# Altium footprint library LimeMicroAltiumLib.PcbLib: 876 footprints (part 53 of 57)
Each footprint in its own frame and in the unit in brackets; x right, y up, seen from the top. Pads: shape width x height; smd on the part's side, far side on the other; paste and mask are expansions set on the pad; w line width, h text height; cw(c..) or ccw(c..) is an arc to the next point about the centre after c.
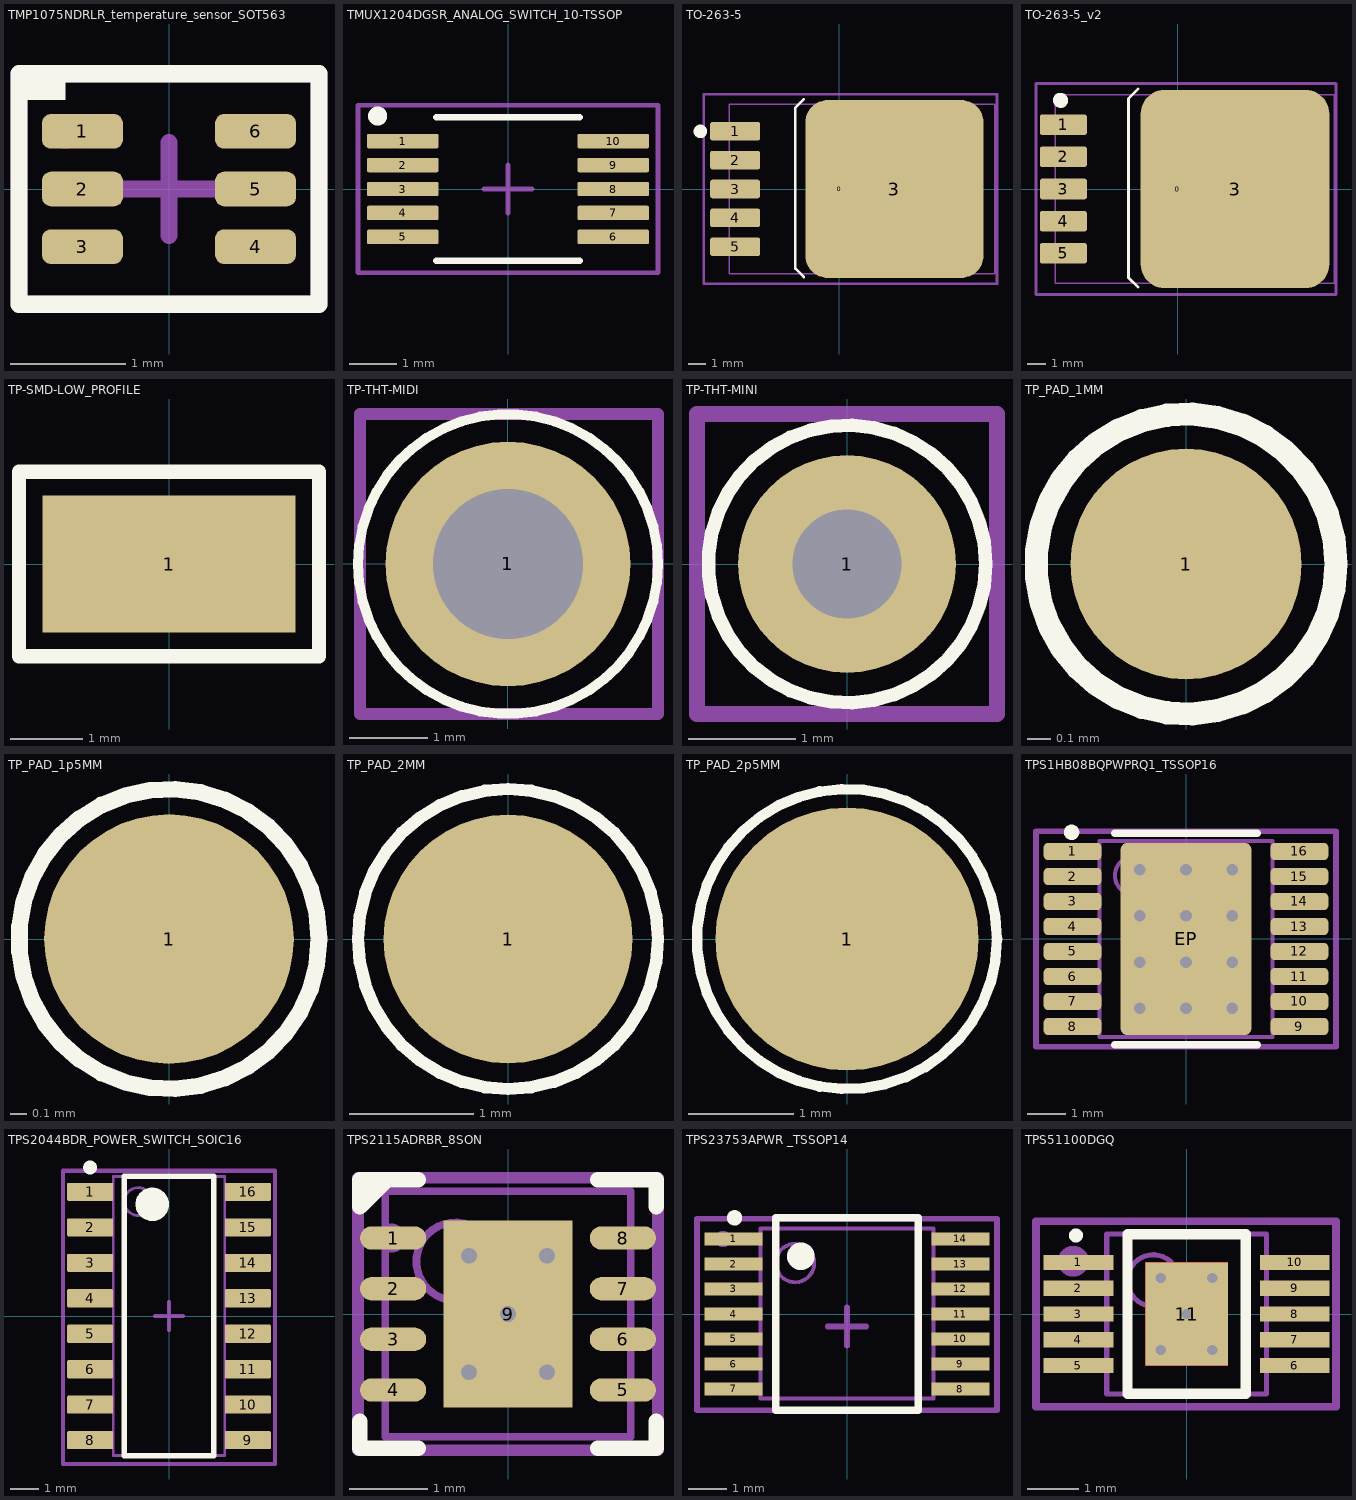
[diagram p52: the footprints below, top view; thin cyan lines are the x and y axes]

## TMP1075NDRLR_temperature_sensor_SOT563 [mm]
pads (6):
  rrect50% 0.7x0.3 smd mask+0.05: 1(-0.75,0.5) 2(-0.75,0) 3(-0.75,-0.5) 4(0.75,-0.5) 5(0.75,0) 6(0.75,0.5)
Top Overlay:
  region: -1.3,0.775 -0.9,0.775 -0.9,1 -1.3,1
  lines w0.15: -1.3,-1 -1.3,1 1.3,1 1.3,-1 -1.3,-1
Mechanical 15:
  circle w0.2: c-0.9,0.5 r0.05
  lines w0.15: -0.4,0 0,0 ; 0,-0.4 0,0 ; 0,0.4 0,0 ; 0.4,0 0,0 ; -1.3,-1 -1.3,1 1.3,1 1.3,-1 -1.3,-1
  text ".Designator" at 0,0 h0.55
3D body "User Library-SOT-563.step": height 0.58, standoff 0, extent -0.813,-0.8 0.813,0.8

## TMUX1204DGSR_ANALOG_SWITCH_10-TSSOP [mm]
pads (10):
  rrect25% 1.5x0.3 smd mask+0.05: 1(-2.2,1) 2(-2.2,0.5) 3(-2.2,0) 4(-2.2,-0.5) 5(-2.2,-1) 6(2.2,-1) 7(2.2,-0.5) 8(2.2,0) 9(2.2,0.5) 10(2.2,1)
Top Overlay:
  circle w0.2: c-2.725,1.525 r0.1
  lines w0.127: -1.5,-1.5 1.5,-1.5 ; -1.5,1.5 1.5,1.5
Mechanical 15:
  circle w0.2: c-2.175,1 r0.035
  lines w0.1: -0.5,0 0,0 ; 0,-0.5 0,0 ; 0,0.5 0,0 ; 0.5,0 0,0 ; -3.135,-1.75 -3.135,1.75 3.135,1.75 3.135,-1.75 -3.135,-1.75
  text ".Designator" at 0,0 h0.55
3D body "TMUX1204DGSR.STEP": height 1.1, standoff 0, extent -2.45,-1.5 2.45,1.5

## TO-263-5 [mm] "D-PAK/TO-263-5; 5 Leads; Body 14.4 (inc. leads) x 10.4 mm (LxW max)"
height 4.65
pads (7):
  round 0.5 on Mech15: 0(0,0)
  rrect25% 2.95x1.1 smd: 1(-6.15,3.41) 2(-6.15,1.705) 3(-6.15,0) 4(-6.15,-1.705) 5(-6.15,-3.41)
  rrect25% 10.5x10.5 smd: 3(3.25,0)
Top Overlay:
  circle w0.4: c-8.2,3.4 r0.2
  lines w0.15: -2.1,-5.2 -2.6,-4.7 -2.6,4.8 -2.1,5.3
Mechanical 13:
  lines w0.076: -6.49,-5 -6.49,5 9.18,5 9.18,-5 -6.49,-5
Mechanical 15:
  circle w0.4: c-6.2,3.4 r0.2
  lines w0.15: -8,-5.6 -8,5.6 9.3,5.6 9.3,-5.6 -8,-5.6
  text ".designator" at 0,0 h0.55
3D body "TO-263-5.stp": height 4.56, standoff 0, extent -6.727,-5.08 7.288,5.08

## TO-263-5_v2 [mm] "D-PAK/TO-263-5; 5 Leads; Body 14.4 (inc. leads) x 10.4 mm (LxW max)"
height 4.65
pads (7):
  round 0.5 on Mech15: 0(0,0)
  rrect25% 2.5x1.1 smd: 1(-6.05,3.41) 2(-6.05,1.705) 3(-6.05,0) 4(-6.05,-1.705) 5(-6.05,-3.41)
  rrect25% 10x10.5 smd: 3(3.05,0)
Top Overlay:
  circle w0.4: c-6.2,4.7 r0.2
  lines w0.15: -2.1,-5.2 -2.6,-4.7 -2.6,4.8 -2.1,5.3
Mechanical 13:
  lines w0.076: -6.49,-5 -6.49,5 8.3,5 8.3,-5 -6.49,-5
Mechanical 15:
  circle w0.4: c-6.2,3.4 r0.2
  lines w0.15: -7.5,-5.6 -7.5,5.6 8.4,5.6 8.4,-5.6 -7.5,-5.6
  text ".designator" at 0,0 h0.55
3D body "TO-263-5.stp": height 4.56, standoff 0, extent -6.727,-5.08 7.288,5.08

## TP-SMD-LOW_PROFILE [mm] "SMD test point loop"
height 4.6
pads (1):
  rect 3.5x1.9 smd: 1(0,0)
Top Overlay:
  lines w0.2: -2.075,-1.275 2.075,-1.275 2.075,1.275 -2.075,1.275 -2.075,-1.275
Mechanical 13:
  circle w0.076: c0,0 r0.76
Mechanical 15:
  lines w0.15: -2.075,-1.275 2.075,-1.275 2.075,1.275 -2.075,1.275 -2.075,-1.275
  text ".Designator" at 0,0 h0.55
3D body "RCW (1206).stp": height 2, standoff 0, extent -1.6,-0.8 1.6,0.8

## TP-THT-MIDI [mm] "Thru-hole test point loop"
height 4.6
pads (1):
  round 3.1 hole 1.9: 1(0,0)
Top Overlay:
  circle w0.127: c0,0 r1.9
Mechanical 13:
  circle w0.076: c0,0 r0.76
Mechanical 15:
  lines w0.15: -0.675,0 0,0 ; 0,-0.675 0,0 ; 0,0.675 0,0 ; 0.675,0 0,0 ; -1.875,-1.9 -1.875,1.9 1.9,1.9 1.9,-1.9 -1.875,-1.9
  text ".Designator" at 0,0 h0.55
3D body "TestPoint_Multi.stp": height 8.09, standoff -3.21, extent -1.597,-1.6 1.597,1.587

## TP-THT-MINI [mil] "Thru-hole test point loop"
height 181.1
pads (1):
  round 80 / inner round 80 / far side round 90 hole 40: 1(0,0)
Top Overlay:
  circle w5: c0,0 r51
Mechanical 13:
  circle w3: c0,0 r29.94
Mechanical 15:
  lines w5.91: -24.61,0 0,0 ; 0,-24.61 0,0 ; 0,24.61 0,0 ; 24.61,0 0,0 ; -55.12,-55.12 -55.12,55.12 55.12,55.12 55.12,-55.12 -55.12,-55.12
  text ".Designator" at 0,0 h21.65
3D body "TestPoint_Mini.stp": height 180.51, standoff -118.14, extent -48.82,-49.11 49.21,49.12

## TP_PAD_1MM [mm]
pads (1):
  round 1 smd paste-2 mask+0.05: 1(0,0)
Top Overlay:
  circle w0.1: c0,0 r0.65
Mechanical 15:
  circle w0.6: c0,0 r0.16
  text ".Designator" at 0,0 h0.55

## TP_PAD_1p5MM [mm]
pads (1):
  round 1.5 smd paste-2 mask+0.05: 1(0,0)
Top Overlay:
  circle w0.1: c0,0 r0.901
Mechanical 15:
  circle w0.6: c0,0 r0.269
  text ".Designator" at 0,0 h0.55

## TP_PAD_2MM [mm]
pads (1):
  round 2 smd paste-2 mask+0.05: 1(0,0)
Top Overlay:
  circle w0.1: c0,0 r1.206
Mechanical 15:
  circle w0.6: c0,0 r0.369
  text ".Designator" at 0,0 h0.55

## TP_PAD_2p5MM [mm]
pads (1):
  round 2.5 smd paste-3 mask+0.05: 1(0,0)
Top Overlay:
  circle w0.1: c0,0 r1.427
Mechanical 15:
  text ".Designator" at 0,0 h0.55

## TPS1HB08BQPWPRQ1_TSSOP16 [mm]
pads (17):
  rrect50% 1.5x0.45 smd mask+0.05: 1(-2.95,2.275) 2(-2.95,1.625) 3(-2.95,0.975) 4(-2.95,0.325) 5(-2.95,-0.325) 6(-2.95,-0.975) 7(-2.95,-1.625) 8(-2.95,-2.275) 9(2.95,-2.275) 10(2.95,-1.625) 11(2.95,-0.975) 12(2.95,-0.325) 13(2.95,0.325) 14(2.95,0.975) 15(2.95,1.625) 16(2.95,2.275)
  rrect10% 3.4x5 smd paste-5: EP(0,0)
via -1.2,1.8 diameter 0.6 hole 0.3
via 1.2,1.8 diameter 0.6 hole 0.3
via 0,1.8 diameter 0.6 hole 0.3
via -1.2,0.6 diameter 0.6 hole 0.3
via 0,0.6 diameter 0.6 hole 0.3
via 1.2,0.6 diameter 0.6 hole 0.3
via 1.2,-0.6 diameter 0.6 hole 0.3
via 0,-0.6 diameter 0.6 hole 0.3
via -1.2,-0.6 diameter 0.6 hole 0.3
via -1.2,-1.8 diameter 0.6 hole 0.3
via 0,-1.8 diameter 0.6 hole 0.3
via 1.2,-1.8 diameter 0.6 hole 0.3
Top Overlay:
  circle w0.25: c-2.975,2.775 r0.075
  lines w0.2: -1.85,-2.75 1.85,-2.75 ; -1.85,2.75 1.85,2.75
Top Paste:
  region: -1.4,-1.7 -1.4,1.7 1.4,1.7 1.4,-1.7
Top Solder:
  region: -1.4,-1.7 -1.4,1.7 1.4,1.7 1.4,-1.7
Mechanical 13:
  circle w0.1: c-1.35,1.65 r0.5
  lines w0.1: -2.25,-2.55 2.25,-2.55 2.25,2.55 -2.25,2.55 -2.25,-2.55
Mechanical 15:
  circle w0.35: c-3.225,2.275 r0.035
  lines w0.15: -0.5,0 0.5,0 ; 0,-0.5 0,0.5 ; -3.9,-2.8 3.9,-2.8 3.9,2.8 -3.9,2.8 -3.9,-2.8
  text ".Designator" at 0,0 h0.55
3D body "User Library-TSSOP-16-1.step": height 1.1, standoff 0, extent -3.2,-2.5 3.2,2.5

## TPS2044BDR_POWER_SWITCH_SOIC16 [mm]
pads (16):
  rrect15% 1.65x0.65 smd: 1(-2.825,4.445) 2(-2.825,3.175) 3(-2.825,1.905) 4(-2.825,0.635) 5(-2.825,-0.635) 6(-2.825,-1.905) 7(-2.825,-3.175) 8(-2.825,-4.445) 9(2.825,-4.445) 10(2.825,-3.175) 11(2.825,-1.905) 12(2.825,-0.635) 13(2.825,0.635) 14(2.825,1.905) 15(2.825,3.175) 16(2.825,4.445)
Top Overlay:
  circle w0.25: c-2.825,5.32 r0.125
  circle w0.6: c-0.6,4 r0.3
  lines w0.2: -1.6,-5 -1.6,5 1.6,5 1.6,-5 -1.6,-5
Mechanical 13:
  circle w0.1: c-1.1,4.1 r0.5
  lines w0.1: -2,-5 -2,5 2,5 2,-5 -2,-5
Mechanical 15:
  circle w0.2: c-2.8,4.4 r0.1
  lines w0.15: -0.5,0 0.5,0 ; 0,-0.5 0,0.5 ; -3.8,-5.3 -3.8,5.2 3.8,5.2 3.8,-5.3 -3.8,-5.3
  text ".Designator" at 0,0 h0.55
3D body "SOIC-16akaD0016AakaM16A.stp": height 1.59, standoff -0.01, extent -2.997,-4.953 2.997,4.953

## TPS2115ADRBR_8SON [mm] "SON, 8-Leads, Body 3x3mm, Pitch 0.65mm, Thermal Pad 2.4x1.65mm, TI Recommended"
height 1
pads (9):
  oval 0.85x0.3 smd paste-0.025 mask+0.07: 1(-1.475,0.975) 2(-1.475,0.325) 3(-1.475,-0.325) 4(-1.475,-0.975) 5(1.475,-0.975) 6(1.475,-0.325) 7(1.475,0.325) 8(1.475,0.975)
  rect 1.65x2.4 smd paste-0.825 mask+0.07: 9(0,0)
via 0,0 diameter 0.5 hole 0.2
via 0.5,-0.75 diameter 0.5 hole 0.2
via -0.5,-0.75 diameter 0.5 hole 0.2
via -0.5,0.75 diameter 0.5 hole 0.2
via 0.5,0.75 diameter 0.5 hole 0.2
Top Overlay:
  region: -1.55,1.725 -1.9,1.725 -1.9,1.375
  lines w0.2: -1.9,-1.375 -1.9,-1.725 -1.15,-1.725 ; -1.55,1.725 -1.9,1.375 -1.9,1.725 -1.15,1.725 ; 1.15,-1.725 1.9,-1.725 1.9,-1.375 ; 1.15,1.725 1.9,1.725 1.9,1.375
Top Paste:
  rectangle: -0.775,0.125 -0.125,1.125
  region: 0.775,1.125 0.125,1.125 0.125,0.125 0.775,0.125
  region: 0.775,-0.125 0.125,-0.125 0.125,-1.125 0.775,-1.125
  rectangle: -0.775,-1.125 -0.125,-0.125
Mechanical 13:
  circle w0.1: c-0.675,0.675 r0.5
  lines w0.1: -1.575,-1.575 -1.575,1.575 1.575,1.575 1.575,-1.575 -1.575,-1.575
Mechanical 15:
  circle w0.3: c-1.5,0.975 r0.035
  lines w0.15: -0.5,0 0.5,0 ; 0,-0.5 0,0.5 ; -1.925,-1.75 -1.925,1.75 1.925,1.75 1.925,-1.75 -1.925,-1.75
  text ".Designator" at 0,0 h0.55
3D body "User Library-SON8_3mm.step": height 1, standoff 0, extent -1.575,-1.575 1.575,1.575

## TPS23753APWR _TSSOP14 [mm]
pads (14):
  rect 1.5x0.35 smd: 1(-2.95,1.95) 2(-2.95,1.3) 3(-2.95,0.65) 4(-2.95,0) 5(-2.95,-0.65) 6(-2.95,-1.3) 7(-2.95,-1.95) 8(2.95,-1.95) 9(2.95,-1.3) 10(2.95,-0.65) 11(2.95,0) 12(2.95,0.65) 13(2.95,1.3) 14(2.95,1.95)
Top Overlay:
  circle w0.25: c-2.925,2.5 r0.075
  circle w0.6: c-1.2,1.5 r0.056
  lines w0.2: -1.85,-2.5 -1.85,2.5 1.85,2.5 1.85,-2.5 -1.85,-2.5
Mechanical 13:
  circle w0.1: c-1.35,1.325 r0.5
  lines w0.1: -2.25,-2.2 -2.25,2.225 2.25,2.225 2.25,-2.2 -2.25,-2.2
Mechanical 15:
  circle w0.35: c-3.225,1.95 r0.035
  lines w0.15: -0.5,-0.325 0.5,-0.325 ; 0,-0.825 0,0.175 ; -3.9,-2.5 -3.9,2.475 3.9,2.475 3.9,-2.5 -3.9,-2.5
  text ".Designator" at 0,-0.325 h0.55
3D body "User Library-TSSOP14-1.step": height 1.1, standoff 0, extent -3.2,-2.5 3.2,2.5

## TPS51100DGQ [mm] "TSSOP, 10-Leads, Body 3,00x3,00mm, Pitch 0,50mm, IPC Medium Density"
height 1.1
pads (11):
  rect 1.35x0.3 smd: 1(-2.1,1) 2(-2.1,0.5) 3(-2.1,0) 4(-2.1,-0.5) 5(-2.1,-1) 6(2.1,-1) 7(2.1,-0.5) 8(2.1,0) 9(2.1,0.5) 10(2.1,1)
  rect 1.6x2 smd: 11(0,0)
via -0.5,0.7 diameter 0.4 hole 0.2
via 0.5,0.7 diameter 0.4 hole 0.2
via 0.5,-0.7 diameter 0.4 hole 0.2
via -0.5,-0.7 diameter 0.4 hole 0.2
via 0,0 diameter 0.4 hole 0.2
Top Layer:
  region: -0.8,-1 0.8,-1 0.8,1 -0.8,1
Top Overlay:
  circle w0.2: c-2.15,1.525 r0.035
  lines w0.2: -1.15,-1.55 1.15,-1.55 1.15,1.55 -1.15,1.55 -1.15,-1.55
Mechanical 13:
  circle w0.1: c-0.65,0.65 r0.5
  lines w0.1: -1.55,-1.55 1.55,-1.55 1.55,1.55 -1.55,1.55 -1.55,-1.55
Mechanical 15:
  circle w0.3: c-2.2,1.025 r0.15
  lines w0.15: -0.5,0 0.5,0 ; 0,-0.5 0,0.5 ; -2.925,-1.8 2.9,-1.8 2.9,1.8 -2.925,1.8 -2.925,-1.8
  text ".Designator" at 0,0 h0.55
3D body "User Library-MSOP-10-1.step": height 1.05, standoff 0, extent -2.514,-1.5 2.514,1.5